# Altium footprint library custom-case.PcbLib: 483 footprints (part 29 of 31)
Each footprint in its own frame and in the unit in brackets; x right, y up, seen from the top. Pads: shape width x height; smd on the part's side, far side on the other; paste and mask are expansions set on the pad; w line width, h text height; cw(c..) or ccw(c..) is an arc to the next point about the centre after c.
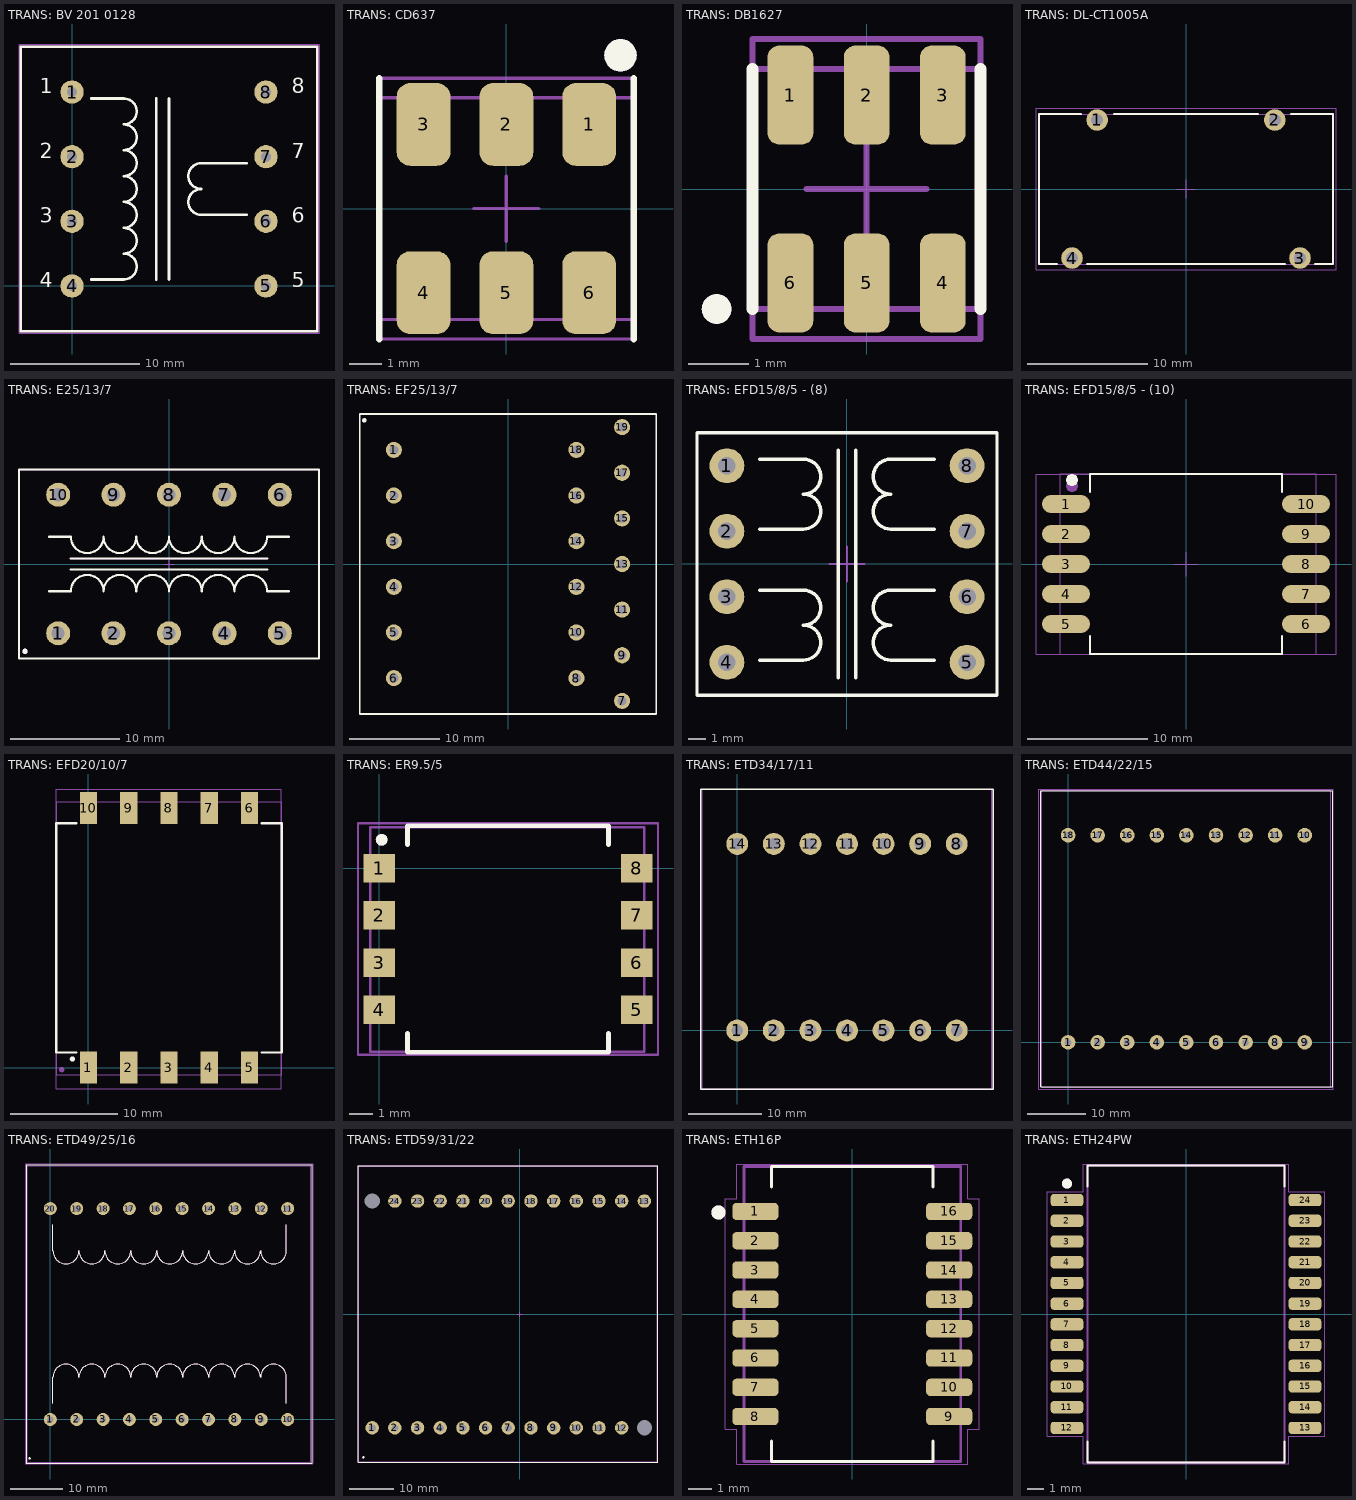
[diagram p28: the footprints below, top view; thin cyan lines are the x and y axes]

## TRANS: BV 201 0128 [mm]
pads (8):
  round 1.8 hole 0.8: 1(0,15) 2(0,10) 3(0,5) 4(0,0) 5(15,0) 6(15,5) 7(15,10) 8(15,15)
Top Overlay:
  lines w0.2: 1.5,0.5 4,0.5 ccw(c4,1.5) 4,2.5 ccw(c4,3.5) 4,4.5 ccw(c4,5.5) 4,6.5 ccw(c4,7.5) 4,8.5 ccw(c4,9.5) 4,10.5 ccw(c4,11.5) 4,12.5 ccw(c4,13.5) 4,14.5 1.5,14.5 ; 6.5,0.5 6.5,14.5 ; 7.5,0.5 7.5,14.5 ; 13.5,5.5 10,5.5 cw(c10,6.5) 10,7.5 cw(c10,8.5) 10,9.5 13.5,9.5 ; -3.95,-3.5 18.95,-3.5 18.95,18.5 -3.95,18.5 -3.95,-3.5
  text "2" at -2.5,9.5 h2
  text "4" at -2.5,-0.5 h2
  text "1" at -2.5,14.5 h2
  text "3" at -2.5,4.5 h2
  text "7" at 17,9.5 h2
  text "5" at 17,-0.5 h2
  text "8" at 17,14.5 h2
  text "6" at 17,4.5 h2
Top Assy:
  lines w0.1: 1.5,0.5 4,0.5 ccw(c4,1.5) 4,2.5 ccw(c4,3.5) 4,4.5 ccw(c4,5.5) 4,6.5 ccw(c4,7.5) 4,8.5 ccw(c4,9.5) 4,10.5 ccw(c4,11.5) 4,12.5 ccw(c4,13.5) 4,14.5 1.5,14.5 ; 6.5,0.5 6.5,14.5 ; 7.5,0.5 7.5,14.5 ; 13.5,5.5 10,5.5 cw(c10,6.5) 10,7.5 cw(c10,8.5) 10,9.5 13.5,9.5 ; -3.95,-3.5 -3.95,18.5 18.95,18.5 18.95,-3.5 -3.95,-3.5
  text "1" at -2.5,14.5 h2
  text "2" at -2.5,9.5 h2
  text "3" at -2.5,4.5 h2
  text "4" at -2.5,-0.5 h2
  text "5" at 17,-0.5 h2
  text "6" at 17,4.5 h2
  text "7" at 17,9.5 h2
  text "8" at 17,14.5 h2
Size Area:
  lines w0.1: -4.1,-3.65 -4.1,18.65 19.1,18.65 19.1,-3.65 -4.1,-3.65
3D body "BV 201 0128.STEP": height 15, standoff -4, extent -3.95,-3.5 18.95,18.5

## TRANS: CD637 [mm]
pads (8):
  rrect50% 1.65x2.54 smd: 1(2.54,2.58) 2(0,2.58) 3(-2.54,2.58) 4(-2.54,-2.58) 5(0,-2.58) 6(2.54,-2.58)
  round 1 on Mech1: ""(3.5,4.7)
  round 1 on Top Overlay: ""(3.5,4.7)
Top Overlay:
  lines w0.2: -3.9,-4 -3.9,4 ; 3.9,-4 3.9,4
Top Assy:
  lines w0.1: -3.9,-3.4 -3.9,3.4 3.9,3.4 3.9,-3.4 -3.9,-3.4
Size Area:
  lines w0.1: -1,0 1,0 ; 0,-1 0,1 ; -3.9,-4 -3.9,4 3.9,4 3.9,-4 -3.9,-4
3D body "ADT4-6T+.STEP": height 5.23, standoff 0, extent -3.935,-3.455 3.935,3.455

## TRANS: DB1627 [mm]
pads (8):
  rrect50% 0.76x1.65 smd: 1(-1.27,1.565) 2(0,1.565) 3(1.27,1.565) 4(1.27,-1.565) 5(0,-1.565) 6(-1.27,-1.565)
  round 0.5 on Mech1: ""(-2.5,-2)
  round 0.5 on Top Overlay: ""(-2.5,-2)
Top Overlay:
  lines w0.2: -1.9,-2 -1.9,2 ; 1.9,-2 1.9,2
Top Assy:
  lines w0.1: -1.9,-2 -1.9,2 1.9,2 1.9,-2 -1.9,-2
Size Area:
  lines w0.1: -1,0 1,0 ; 0,-1 0,1 ; -1.9,-2.5 1.9,-2.5 1.9,2.5 -1.9,2.5 -1.9,-2.5
3D body "TCM1-63AX+.STEP": height 3.96, standoff 0, extent -1.905,-2.03 1.905,2.03

## TRANS: DL-CT1005A [mm]
pads (4):
  round 1.8 hole 1: 1(-7.4,5.75) 2(7.4,5.75) 3(9.5,-5.75) 4(-9.5,-5.75)
Top Overlay:
  lines w0.2: -10.75,-6.25 -12.25,-6.25 -12.25,6.25 -8.75,6.25 ; -8.25,-6.25 8.25,-6.25 ; -6,6.25 6,6.25 ; 8.75,6.25 12.25,6.25 12.25,-6.25 10.75,-6.25
3D model:
  lines w0.1: -12.25,-6.25 -12.25,6.25 12.25,6.25 12.25,-6.25 -12.25,-6.25
Size Area:
  lines w0.1: -0.75,0 0.75,0 ; 0,-0.75 0,0.75 ; -12.5,-6.75 12.5,-6.75 12.5,6.75 -12.5,6.75 -12.5,-6.75
3D body "DL-CT1005A.STEP": height 25.05, standoff -3.95, extent -12.25,-6.25 12.25,6.25

## TRANS: E25/13/7 [mm]
pads (12):
  round 2.2 hole 1.2: 1(-10.16,-6.35) 2(-5.08,-6.35) 3(0,-6.35) 4(5.08,-6.35) 5(10.16,-6.35) 6(10.16,6.35) 7(5.08,6.35) 8(0,6.35) 9(-5.08,6.35) 10(-10.16,6.35)
  round 0.5 on Mech1: ""(-13.2,-8)
  round 0.5 on Top Overlay: ""(-13.2,-8)
Top Overlay:
  lines w0.2: -11,-2.5 -9,-2.5 cw(c-7.5,-2.5) -6,-2.5 cw(c-4.5,-2.5) -3,-2.5 cw(c-1.5,-2.5) 0,-2.5 cw(c1.5,-2.5) 3,-2.5 cw(c4.5,-2.5) 6,-2.5 cw(c7.5,-2.5) 9,-2.5 11,-2.5 ; -11,2.5 -9,2.5 ccw(c-7.5,2.5) -6,2.5 ccw(c-4.5,2.5) -3,2.5 ccw(c-1.5,2.5) 0,2.5 ccw(c1.5,2.5) 3,2.5 ccw(c4.5,2.5) 6,2.5 ccw(c7.5,2.5) 9,2.5 11,2.5 ; -9,-0.5 9,-0.5 ; -9,0.5 9,0.5 ; -13.75,-8.65 13.75,-8.65 13.75,8.65 -13.75,8.65 -13.75,-8.65
Top Assy:
  lines w0.1: -11,-2.5 -9,-2.5 cw(c-7.5,-2.5) -6,-2.5 cw(c-4.5,-2.5) -3,-2.5 cw(c-1.5,-2.5) 0,-2.5 cw(c1.5,-2.5) 3,-2.5 cw(c4.5,-2.5) 6,-2.5 cw(c7.5,-2.5) 9,-2.5 11,-2.5 ; -11,2.5 -9,2.5 ccw(c-7.5,2.5) -6,2.5 ccw(c-4.5,2.5) -3,2.5 ccw(c-1.5,2.5) 0,2.5 ccw(c1.5,2.5) 3,2.5 ccw(c4.5,2.5) 6,2.5 ccw(c7.5,2.5) 9,2.5 11,2.5 ; -9,-0.5 9,-0.5 ; -9,0.5 9,0.5 ; -13.75,-8.65 13.75,-8.65 13.75,8.65 -13.75,8.65 -13.75,-8.65
Size Area:
  lines w0.1: -0.5,0 0.5,0 ; 0,-0.5 0,0.5 ; -13.75,-8.65 13.75,-8.65 13.75,8.65 -13.75,8.65 -13.75,-8.65
3D body "User Library-E25_13_7vsbore-1.STEP": height 26.85, standoff -3.5, extent -13.75,-8.65 13.75,8.65

## TRANS: EF25/13/7 [mm]
pads (20):
  round 1.8 hole 1: 1(-12.7,12.7) 2(-12.7,7.62) 3(-12.7,2.54) 4(-12.7,-2.54) 5(-12.7,-7.62) 6(-12.7,-12.7) 7(12.7,-15.24) 8(7.62,-12.7) 9(12.7,-10.16) 10(7.62,-7.62) 11(12.7,-5.08) 12(7.62,-2.54) 13(12.7,0) 14(7.62,2.54) 15(12.7,5.08) 16(7.62,7.62) 17(12.7,10.16) 18(7.62,12.7) 19(12.7,15.24)
  round 0.5 on Top Overlay: ""(-16,16)
Top Overlay:
  lines w0.2: -16.5,-16.7 16.5,-16.7 16.5,16.7 -16.5,16.7 -16.5,-16.7
3D body "Transformator 1 v19.step": height 19.95, standoff -3.45, extent -16.5,-16.74 16.55,16.74

## TRANS: EFD15/8/5 - (8) [mm]
pads (8):
  round 2 hole 1: 1(-6.875,5.625) 2(-6.875,1.875) 3(-6.875,-1.875) 4(-6.875,-5.625) 5(6.875,-5.625) 6(6.875,-1.875) 7(6.875,1.875) 8(6.875,5.625)
Top Overlay:
  lines w0.2: -5,-5.5 -2.5,-5.5 ccw(c-2.5,-4.5) -2.5,-3.5 ccw(c-2.5,-2.5) -2.5,-1.5 -5,-1.5 ; -5,2 -2.5,2 ccw(c-2.5,3) -2.5,4 ccw(c-2.5,5) -2.5,6 -5,6 ; -0.5,-6.5 -0.5,6.5 ; 0.5,-6.5 0.5,6.5 ; 5,-5.5 2.5,-5.5 cw(c2.5,-4.5) 2.5,-3.5 cw(c2.5,-2.5) 2.5,-1.5 5,-1.5 ; 5,2 2.5,2 cw(c2.5,3) 2.5,4 cw(c2.5,5) 2.5,6 5,6 ; -8.587,-7.5 8.588,-7.5 8.588,7.5 -8.587,7.5 -8.587,-7.5
Top Assy:
  lines w0.1: -8.587,-7.5 8.588,-7.5 8.588,7.5 -8.587,7.5 -8.587,-7.5
Size Area:
  lines w0.1: -1,0 1,0 ; 0,-1 0,1 ; -8.587,-7.5 8.588,-7.5 8.588,7.5 -8.587,7.5 -8.587,-7.5
3D body "999.STEP": height 8.41, standoff -3.1, extent -8.587,-7.5 8.588,7.5

## TRANS: EFD15/8/5 - (10) [mm]
pads (12):
  rrect100% 4x1.5 smd: 1(-10,5) 2(-10,2.5) 3(-10,0) 4(-10,-2.5) 5(-10,-5) 6(10,-5) 7(10,-2.5) 8(10,0) 9(10,2.5) 10(10,5)
  round 1 on Mech1: ""(-9.5,6.5)
  round 1 on Top Overlay: ""(-9.5,7)
Top Overlay:
  lines w0.2: -8,-6 -8,-7.5 8,-7.5 8,-6 ; -8,6 -8,7.5 8,7.5 8,6
Top Assy:
  lines w0.1: -10.5,-7.5 10.85,-7.5 10.85,7.5 -10.5,7.5 -10.5,-7.5
Size Area:
  lines w0.1: -1,0 1,0 ; 0,-1 0,1 ; -12.5,-7.5 -12.5,7.5 12.5,7.5 12.5,-7.5 -12.5,-7.5
3D body "EFD15.STEP": height 8.15, standoff -0.05, extent -10.5,-7.5 10.85,7.5

## TRANS: EFD20/10/7 [mm]
pads (12):
  rect 1.6x3 smd: 1(0,0) 2(3.76,0) 3(7.52,0) 4(11.28,0) 5(15.04,0) 6(15.04,24.22) 7(11.28,24.22) 8(7.52,24.22) 9(3.76,24.22) 10(0,24.22)
  round 0.5 on Mech1: ""(-2.5,-0.2)
  round 0.5 on Top Overlay: ""(-1.5,0.8)
Top Overlay:
  lines w0.2: -1.1,1.4 -3,1.4 -3,22.8 -1.1,22.8 ; 16.14,1.4 18.04,1.4 18.04,22.8 16.14,22.8
Top Assy:
  lines w0.1: -2.96,-0.685 -2.96,24.815 18.04,24.815 18.04,-0.685 -2.96,-0.685
Size Area:
  lines w0.1: -3,-2 -3,26 18,26 18,-2 -3,-2
3D body "EFD20 SMD.STEP": height 10.41, standoff 0, extent -3.06,-0.685 17.94,24.815

## TRANS: ER9.5/5 [mm]
pads (10):
  rect 1.35x1.2 smd: 1(0,0) 2(0,-2) 3(0,-4) 4(0,-6) 5(10.9,-6) 6(10.9,-4) 7(10.9,-2) 8(10.9,0)
  round 0.5 on Top Overlay: ""(0.1,1.2)
  round 0.5 on Mech1: ""(0.1,1.2)
Top Overlay:
  lines w0.2: 1.2,-7 1.2,-7.8 9.7,-7.8 9.7,-7 ; 1.2,1 1.2,1.8 9.7,1.8 9.7,1
Top Assy:
  lines w0.1: -0.387,-7.77 11.213,-7.77 11.213,1.73 -0.387,1.73 -0.387,-7.77
Size Area:
  lines w0.1: -0.9,-7.9 -0.9,1.9 11.8,1.9 11.8,-7.9 -0.9,-7.9
3D body "1.STEP": height 5.2, standoff -0.05, extent -0.387,-7.77 11.213,1.73

## TRANS: ETD34/17/11 [mm]
pads (14):
  round 3 hole 1.6: 1(0,0) 2(5,0) 3(10,0) 4(15,0) 5(20,0) 6(25,0) 7(30,0) 8(30,25.5) 9(25,25.5) 10(20,25.5) 11(15,25.5) 12(10,25.5) 13(5,25.5) 14(0,25.5)
Top Overlay:
  lines w0.2: -5,-8 35,-8 35,33 -5,33 -5,-8
Top Assy:
  lines w0.1: -4.8,-8 34.8,-8 34.8,33 -4.8,33 -4.8,-8
Size Area:
  lines w0.1: -5,-8 -5,33 35,33 35,-8 -5,-8
3D body "User Library-ETD34.STEP": height 32.9, standoff -2.44, extent -4.8,-8 34.8,33

## TRANS: ETD44/22/15 [mm]
pads (18):
  round 2.5 hole 1.2: 1(0,0) 2(5.08,0) 3(10.16,0) 4(15.24,0) 5(20.32,0) 6(25.4,0) 7(30.48,0) 8(35.56,0) 9(40.64,0) 10(40.64,35.56) 11(35.56,35.56) 12(30.48,35.56) 13(25.4,35.56) 14(20.32,35.56) 15(15.24,35.56) 16(10.16,35.56) 17(5.08,35.56) 18(0,35.56)
Top Overlay:
  lines w0.2: -4.7,-7.62 45.4,-7.62 45.4,43.18 -4.7,43.18 -4.7,-7.62
Top Assy:
  lines w0.1: -4.48,-7.72 45.12,-7.72 45.12,43.28 -4.48,43.28 -4.48,-7.72
Size Area:
  lines w0.1: -5,-8 -5,43.5 45.5,43.5 45.5,-8 -5,-8
3D body "User Library-ETD44.STEP": height 38.1, standoff -4.5, extent -4.48,-7.72 45.12,43.28

## TRANS: ETD49/25/16 [mm]
pads (21):
  round 2.5 hole 1.2: 1(0,0) 2(5.08,0) 3(10.16,0) 4(15.24,0) 5(20.32,0) 6(25.4,0) 7(30.48,0) 8(35.56,0) 9(40.64,0) 10(45.72,0) 11(45.72,40.64) 12(40.64,40.64) 13(35.56,40.64) 14(30.48,40.64) 15(25.4,40.64) 16(20.32,40.64) 17(15.24,40.64) 18(10.16,40.64) 19(5.08,40.64) 20(0,40.64)
  round 0.5 on Top Overlay: ""(-4,-7.5)
Top Overlay:
  lines w0.2: 0.5,3.14 0.5,8.14 cw(c3,8.14) 5.5,8.14 cw(c8,8.14) 10.5,8.14 cw(c13,8.14) 15.5,8.14 cw(c18,8.14) 20.5,8.14 cw(c23,8.14) 25.5,8.14 cw(c28,8.14) 30.5,8.14 cw(c33,8.14) 35.5,8.14 cw(c38,8.14) 40.5,8.14 cw(c43,8.14) 45.5,8.14 45.5,3.14 ; 0.5,37.5 0.5,32.5 ccw(c3,32.5) 5.5,32.5 ccw(c8,32.5) 10.5,32.5 ccw(c13,32.5) 15.5,32.5 ccw(c18,32.5) 20.5,32.5 ccw(c23,32.5) 25.5,32.5 ccw(c28,32.5) 30.5,32.5 ccw(c33,32.5) 35.5,32.5 ccw(c38,32.5) 40.5,32.5 ccw(c43,32.5) 45.5,32.5 45.5,37.5 ; -4.65,-8.425 50.375,-8.425 50.375,49.075 -4.65,49.075 -4.65,-8.425
Top Assy:
  lines w0.1: 0.5,3.14 0.5,8.14 cw(c3,8.14) 5.5,8.14 cw(c8,8.14) 10.5,8.14 cw(c13,8.14) 15.5,8.14 cw(c18,8.14) 20.5,8.14 cw(c23,8.14) 25.5,8.14 cw(c28,8.14) 30.5,8.14 cw(c33,8.14) 35.5,8.14 cw(c38,8.14) 40.5,8.14 cw(c43,8.14) 45.5,8.14 45.5,3.14 ; 0.5,37.5 0.5,32.5 ccw(c3,32.5) 5.5,32.5 ccw(c8,32.5) 10.5,32.5 ccw(c13,32.5) 15.5,32.5 ccw(c18,32.5) 20.5,32.5 ccw(c23,32.5) 25.5,32.5 ccw(c28,32.5) 30.5,32.5 ccw(c33,32.5) 35.5,32.5 ccw(c38,32.5) 40.5,32.5 ccw(c43,32.5) 45.5,32.5 45.5,37.5 ; -4.49,-8.28 50.21,-8.28 50.21,48.92 -4.49,48.92 -4.49,-8.28
Size Area:
  lines w0.1: -4.8,-8.575 -4.8,49.225 50.525,49.225 50.525,-8.575 -4.8,-8.575
3D body "222.STEP": height 41, standoff -3.86, extent -4.49,-8.28 50.21,48.92

## TRANS: ETD59/31/22 [mm]
pads (28):
  round 0.5 on Mech1: 1(-35,-32)
  round 0.5 on Top Overlay: 1(-35,-32)
  round 3 hole 1.6: 1(-33.02,-25.4) 2(-27.94,-25.4) 3(-22.86,-25.4) 4(-17.78,-25.4) 5(-12.7,-25.4) 6(-7.62,-25.4) 7(-2.54,-25.4) 8(2.54,-25.4) 9(7.62,-25.4) 10(12.7,-25.4) 11(17.78,-25.4) 12(22.86,-25.4) 13(27.94,25.4) 14(22.86,25.4) 15(17.78,25.4) 16(12.7,25.4) 17(7.62,25.4) 18(2.54,25.4) 19(-2.54,25.4) 20(-7.62,25.4) 21(-12.7,25.4) 22(-17.78,25.4) 23(-22.86,25.4) 24(-27.94,25.4)
  round 3 hole 3.4: ""(-33.02,25.4) ""(27.94,-25.4)
Top Overlay:
  lines w0.2: -36.2,-33.1 -36.2,33.3 31,33.3 31,-33.1 -36.2,-33.1
Top Assy:
  lines w0.1: -36.04,33.146 30.86,33.146 30.86,-32.953 -36.04,-32.953 -36.04,33.107 -36,33.146
Size Area:
  lines w0.1: -0.5,0 0.5,0 ; 0,-0.5 0,0.5 ; -36.2,-33.1 -36.2,33.3 31,33.3 31,-33.1 -36.2,-33.1
3D body "ETD59-31-22.STEP": height 51.38, standoff -1.62, extent -36.039,-32.953 30.86,33.146

## TRANS: ETH16P [mm]
pads (16):
  rrect50% 2x0.75 smd: 1(-4.2,4.445) 2(-4.2,3.175) 3(-4.2,1.905) 4(-4.2,0.635) 5(-4.2,-0.635) 6(-4.2,-1.905) 7(-4.2,-3.175) 8(-4.2,-4.445) 9(4.2,-4.445) 10(4.2,-3.175) 11(4.2,-1.905) 12(4.2,-0.635) 13(4.2,0.635) 14(4.2,1.905) 15(4.2,3.175) 16(4.2,4.445)
Top Overlay:
  circle w0.3: c-5.8,4.4 r0.158
  lines w0.127: -3.5,-5.5 -3.5,-6.4 3.5,-6.4 3.5,-5.5 ; -3.5,5.5 -3.5,6.4 3.5,6.4 3.5,5.5
3D model:
  circle w0.3: c-5.8,4.4 r0.158
  lines w0.127: -4.7,-6.4 -4.7,6.4 4.7,6.4 4.7,-6.4 -4.7,-6.4
Size Area:
  lines w0.05: -5.5,-5 -5.5,5 -5,5 -5,6.5 5,6.5 5,5 5.5,5 5.5,-5 5,-5 5,-6.5 -5,-6.5 -5,-5 -5.5,-5
3D body "ETH16P.STEP": height 5.65, standoff 0, extent -4.65,-6.4 4.65,6.4

## TRANS: ETH24PW [mm]
pads (24):
  rrect50% 2x0.75 smd: 1(-7.3,6.985) 2(-7.3,5.715) 3(-7.3,4.445) 4(-7.3,3.175) 5(-7.3,1.905) 6(-7.3,0.635) 7(-7.3,-0.635) 8(-7.3,-1.905) 9(-7.3,-3.175) 10(-7.3,-4.445) 11(-7.3,-5.715) 12(-7.3,-6.985) 13(7.3,-6.985) 14(7.3,-5.715) 15(7.3,-4.445) 16(7.3,-3.175) 17(7.3,-1.905) 18(7.3,-0.635) 19(7.3,0.635) 20(7.3,1.905) 21(7.3,3.175) 22(7.3,4.445) 23(7.3,5.715) 24(7.3,6.985)
Top Overlay:
  circle w0.3: c-7.3,8 r0.158
  lines w0.127: -6.05,-7.82 -6.05,-9.1 6.05,-9.1 6.05,-7.82 ; -6.05,7.82 -6.05,9.1 6.05,9.1 6.05,7.82
3D model:
  circle w0.3: c-7.3,8 r0.158
  lines w0.127: -6.05,-9.1 6.05,-9.1 6.05,9.1 -6.05,9.1 -6.05,-9.1
Size Area:
  lines w0.05: -8.5,-7.5 -6.3,-7.5 -6.3,-9.2 6.3,-9.2 6.3,-7.5 8.5,-7.5 8.5,7.5 6.3,7.5 6.3,9.2 -6.3,9.2 -6.3,7.5 -8.5,7.5 -8.5,-7.5
3D body "ETH24PW.STEP": height 6.6, standoff 0, extent -8.001,-9.08 8.001,9.08